# Altium footprint library 2020-05-17_08-33-02.PcbLib: 3 footprints
Each footprint in its own frame and in the unit in brackets; x right, y up, seen from the top. Pads: shape width x height; smd on the part's side, far side on the other; paste and mask are expansions set on the pad; w line width, h text height; cw(c..) or ccw(c..) is an arc to the next point about the centre after c.
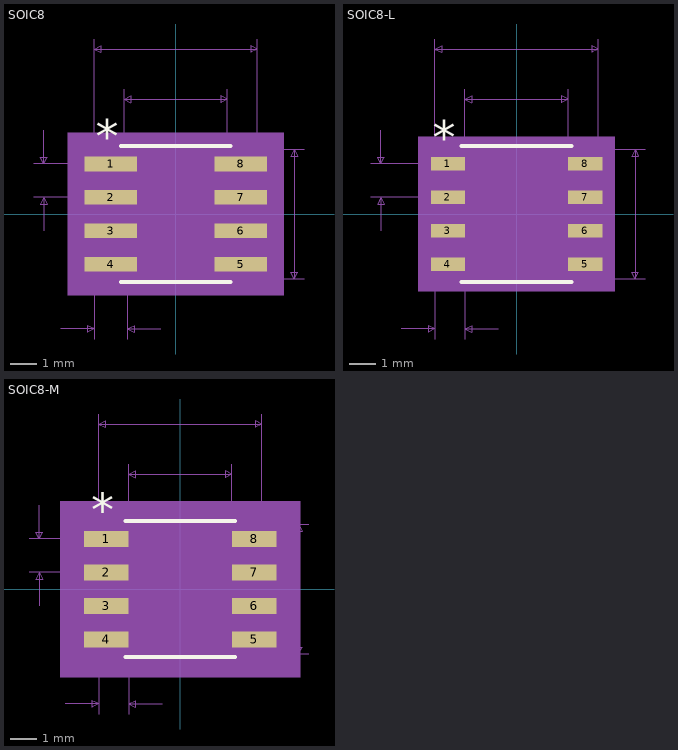
[diagram p0: the footprints below, top view; thin cyan lines are the x and y axes]

## SOIC8 [mil]
pads (8):
  rect 78x22 smd: 1(-97,75) 2(-97,25) 3(-97,-25) 4(-97,-75) 5(97,-75) 6(97,-25) 7(97,25) 8(97,75)
Top Overlay:
  lines w6: -82,-101.5 82,-101.5 ; -82,101.5 82,101.5
  text "*" at -119.5,92 h50
Mechanical 5:
  region: 161,-121.5 -161,-121.5 -161,121.5 161,121.5
Mechanical 7:
  lines w1: -212,25 -97,25 ; -212,75 -97,75 ; -197,-25 -197,25 ; -197,125 -197,75 ; -172,-171.5 -122,-171.5 ; -122,-186.5 -122,0 -122,261.5 ; -77,0 -77,186.5 ; -72,-186.5 -72,0 ; -22,-171.5 -72,-171.5 ; 0,-96.5 192,-96.5 ; 0,96.5 192,96.5 ; 77,0 77,186.5 ; 122,0 122,261.5 ; -197,25 -202,15 -192,15 -197,25 ; -197,75 -202,85 -192,85 -197,75 ; -122,-171.5 -132,-166.5 -132,-176.5 -122,-171.5 ; -122,246.5 122,246.5 ; -122,246.5 -112,251.5 -112,241.5 -122,246.5 ; -77,171.5 77,171.5 ; -77,171.5 -67,176.5 -67,166.5 -77,171.5 ; -72,-171.5 -62,-166.5 -62,-176.5 -72,-171.5 ; 77,171.5 67,176.5 67,166.5 77,171.5 ; 122,246.5 112,251.5 112,241.5 122,246.5 ; 177,-96.5 177,96.5 ; 177,-96.5 172,-86.5 182,-86.5 177,-96.5 ; 177,96.5 172,86.5 182,86.5 177,96.5
  text "Default Padstyle: RX78Y22D0T" at -350,-296.5 h50
  text "Pin One Padstyle: RX78Y22D0T" at -350,-356.5 h50
  text "Alt 1 Padstyle: OX60Y90D30P" at -337.5,-536.5 h50
  text "Alt 2 Padstyle: OX90Y60D30P" at -337.5,-596.5 h50
  text "0.154in/3.912mm" at -93.75,191.5 h25
  text "0.244in/6.198mm" at -93.75,266.5 h25
  text "0.193in/4.902mm" at 197,-12.5 h25
  text "0.05in/1.27mm" at -379.5,37.5 h25
  text "0.05in/1.27mm" at -178.25,-216.5 h25
Mechanical 13:
  lines w0: -12,96.5 ccw(c0,96.5) 12,96.5
  lines w1: -122,-85 -122,-65 -77,-65 -77,-85 -122,-85 ; -122,-35 -122,-15 -77,-15 -77,-35 -122,-35 ; -122,15 -122,35 -77,35 -77,15 -122,15 ; -122,65 -122,85 -77,85 -77,65 -122,65 ; -77,-96.5 77,-96.5 77,96.5 -77,96.5 -77,-96.5 ; 77,-85 77,-65 122,-65 122,-85 77,-85 ; 77,-35 77,-15 122,-15 122,-35 77,-35 ; 77,15 77,35 122,35 122,15 77,15 ; 77,65 77,85 122,85 122,65 77,65
  text "*" at -74.5,43.5 h50
Mechanical 15:
  region: -87,-96 -146,-96 -146,96 -87,96 -87,106.5 87,106.5 87,96 146,96 146,-96 87,-96 87,-106.5 -87,-106.5
  lines w6: -146,-96 -146,96 -87,96 -87,106.5 87,106.5 87,96 146,96 146,-96 87,-96 87,-106.5 -87,-106.5 -87,-96 -146,-96
3D body: height 10, standoff 0, extent 0,0 10,10

## SOIC8-L [mil]
pads (8):
  rect 51x20 smd paste+0 mask+0: 1(-102.5,75) 2(-102.5,25) 3(-102.5,-25) 4(-102.5,-75) 5(102.5,-75) 6(102.5,-25) 7(102.5,25) 8(102.5,75)
Top Overlay:
  lines w6: -82,-101.5 82,-101.5 ; -82,101.5 82,101.5
  text "*" at -125,90 h50
Mechanical 5:
  region: 147,-115.5 -147,-115.5 -147,115.5 147,115.5
Mechanical 7:
  lines w1: -217.5,25 -102.5,25 ; -217.5,75 -102.5,75 ; -202.5,-25 -202.5,25 ; -202.5,125 -202.5,75 ; -172,-171.5 -122,-171.5 ; -122,-186.5 -122,0 -122,261.5 ; -77,-186.5 -77,0 -77,186.5 ; -27,-171.5 -77,-171.5 ; 0,-96.5 192,-96.5 ; 0,96.5 192,96.5 ; 77,0 77,186.5 ; 122,0 122,261.5 ; -202.5,25 -207.5,15 -197.5,15 -202.5,25 ; -202.5,75 -207.5,85 -197.5,85 -202.5,75 ; -122,-171.5 -132,-166.5 -132,-176.5 -122,-171.5 ; -122,246.5 122,246.5 ; -122,246.5 -112,251.5 -112,241.5 -122,246.5 ; -77,-171.5 -67,-166.5 -67,-176.5 -77,-171.5 ; -77,171.5 77,171.5 ; -77,171.5 -67,176.5 -67,166.5 -77,171.5 ; 77,171.5 67,176.5 67,166.5 77,171.5 ; 122,246.5 112,251.5 112,241.5 122,246.5 ; 177,-96.5 177,96.5 ; 177,-96.5 172,-86.5 182,-86.5 177,-96.5 ; 177,96.5 172,86.5 182,86.5 177,96.5
  text "Default Padstyle: RX51Y20D0T" at -350,-296.5 h50
  text "Pin One Padstyle: RX51Y20D0T" at -350,-356.5 h50
  text "Alt 1 Padstyle: OX60Y90D30P" at -337.5,-536.5 h50
  text "Alt 2 Padstyle: OX90Y60D30P" at -337.5,-596.5 h50
  text "0.154in/3.912mm" at -93.75,191.5 h25
  text "0.244in/6.198mm" at -93.75,266.5 h25
  text "0.193in/4.902mm" at 197,-12.5 h25
  text "0.05in/1.27mm" at -385,37.5 h25
  text "0.05in/1.27mm" at -180.75,-216.5 h25
Mechanical 13:
  lines w0: -12,96.5 ccw(c0,96.5) 12,96.5
  lines w1: -122,-85 -122,-65 -77,-65 -77,-85 -122,-85 ; -122,-35 -122,-15 -77,-15 -77,-35 -122,-35 ; -122,15 -122,35 -77,35 -77,15 -122,15 ; -122,65 -122,85 -77,85 -77,65 -122,65 ; -77,-96.5 77,-96.5 77,96.5 -77,96.5 -77,-96.5 ; 77,-85 77,-65 122,-65 122,-85 77,-85 ; 77,-35 77,-15 122,-15 122,-35 77,-35 ; 77,15 77,35 122,35 122,15 77,15 ; 77,65 77,85 122,85 122,65 77,65
  text "*" at -74.5,43.5 h50
Mechanical 15:
  region: -81,-89 -132,-89 -132,89 -81,89 -81,100.5 81,100.5 81,89 132,89 132,-89 81,-89 81,-100.5 -81,-100.5
  lines w6: -132,-89 -132,89 -81,89 -81,100.5 81,100.5 81,89 132,89 132,-89 81,-89 81,-100.5 -81,-100.5 -81,-89 -132,-89
3D body: height 10, standoff 0, extent 0,0 10,10

## SOIC8-M [mil]
pads (8):
  rect 67x24 smd paste+0 mask+0: 1(-110.5,75) 2(-110.5,25) 3(-110.5,-25) 4(-110.5,-75) 5(110.5,-75) 6(110.5,-25) 7(110.5,25) 8(110.5,75)
Top Overlay:
  lines w6: -82,-101.5 82,-101.5 ; -82,101.5 82,101.5
  text "*" at -133,94 h50
Mechanical 5:
  region: 179,-131.5 -179,-131.5 -179,131.5 179,131.5
Mechanical 7:
  lines w1: -225.5,25 -110.5,25 ; -225.5,75 -110.5,75 ; -210.5,-25 -210.5,25 ; -210.5,125 -210.5,75 ; -172,-171.5 -122,-171.5 ; -122,-186.5 -122,0 -122,261.5 ; -77,-186.5 -77,0 -77,186.5 ; -27,-171.5 -77,-171.5 ; 0,-96.5 192,-96.5 ; 0,96.5 192,96.5 ; 77,0 77,186.5 ; 122,0 122,261.5 ; -210.5,25 -215.5,15 -205.5,15 -210.5,25 ; -210.5,75 -215.5,85 -205.5,85 -210.5,75 ; -122,-171.5 -132,-166.5 -132,-176.5 -122,-171.5 ; -122,246.5 122,246.5 ; -122,246.5 -112,251.5 -112,241.5 -122,246.5 ; -77,-171.5 -67,-166.5 -67,-176.5 -77,-171.5 ; -77,171.5 77,171.5 ; -77,171.5 -67,176.5 -67,166.5 -77,171.5 ; 77,171.5 67,176.5 67,166.5 77,171.5 ; 122,246.5 112,251.5 112,241.5 122,246.5 ; 177,-96.5 177,96.5 ; 177,-96.5 172,-86.5 182,-86.5 177,-96.5 ; 177,96.5 172,86.5 182,86.5 177,96.5
  text "Default Padstyle: RX67Y24D0T" at -350,-296.5 h50
  text "Pin One Padstyle: RX67Y24D0T" at -350,-356.5 h50
  text "Alt 1 Padstyle: OX60Y90D30P" at -337.5,-536.5 h50
  text "Alt 2 Padstyle: OX90Y60D30P" at -337.5,-596.5 h50
  text "0.154in/3.912mm" at -93.75,191.5 h25
  text "0.244in/6.198mm" at -93.75,266.5 h25
  text "0.193in/4.902mm" at 197,-12.5 h25
  text "0.05in/1.27mm" at -393,37.5 h25
  text "0.05in/1.27mm" at -180.75,-216.5 h25
Mechanical 13:
  lines w0: -12,96.5 ccw(c0,96.5) 12,96.5
  lines w1: -122,-85 -122,-65 -77,-65 -77,-85 -122,-85 ; -122,-35 -122,-15 -77,-15 -77,-35 -122,-35 ; -122,15 -122,35 -77,35 -77,15 -122,15 ; -122,65 -122,85 -77,85 -77,65 -122,65 ; -77,-96.5 77,-96.5 77,96.5 -77,96.5 -77,-96.5 ; 77,-85 77,-65 122,-65 122,-85 77,-85 ; 77,-35 77,-15 122,-15 122,-35 77,-35 ; 77,15 77,35 122,35 122,15 77,15 ; 77,65 77,85 122,85 122,65 77,65
  text "*" at -74.5,43.5 h50
Mechanical 15:
  region: -97,-107 -164,-107 -164,107 -97,107 -97,116.5 97,116.5 97,107 164,107 164,-107 97,-107 97,-116.5 -97,-116.5
  lines w6: -164,-107 -164,107 -97,107 -97,116.5 97,116.5 97,107 164,107 164,-107 97,-107 97,-116.5 -97,-116.5 -97,-107 -164,-107
3D body: height 10, standoff 0, extent 0,0 10,10